# Altium integrated library TPS54360DDAR (1).IntLib: 1 symbol
Pins are listed as number, name and electrical type; pins without a type are passive.

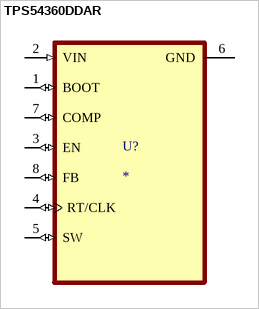
[diagram p0: symbol TPS54360DDAR]

## TPS54360DDAR
designator U?
4.5V to 60 V Input, 3.5 A Step-Down Converter with Eco-mode; MF: Texas Instruments; MP: TPS54360DDAR; SnapEDA_Link: https://www.snapeda.com/parts/TPS54360DDAR/Texas+Instruments/view-part/?ref=snap; Package: HSOIC-8 Texas Instruments; Value: *; Check_prices: https://www.snapeda.com/parts/TPS54360DDAR/Texas+Instruments/view-part/?ref=eda
footprint VREG_LM5017MR/NOPB
pins: 1 BOOT (io), 2 VIN (in), 3 EN (io), 4 RT/CLK (io), 5 SW (io), 6 GND (power), 7 COMP (io), 8 FB (io)